# Altium schematic symbol library HeltecModule.SCHLIB: 8 symbols
Pins are listed as number, name and electrical type; pins without a type are passive.

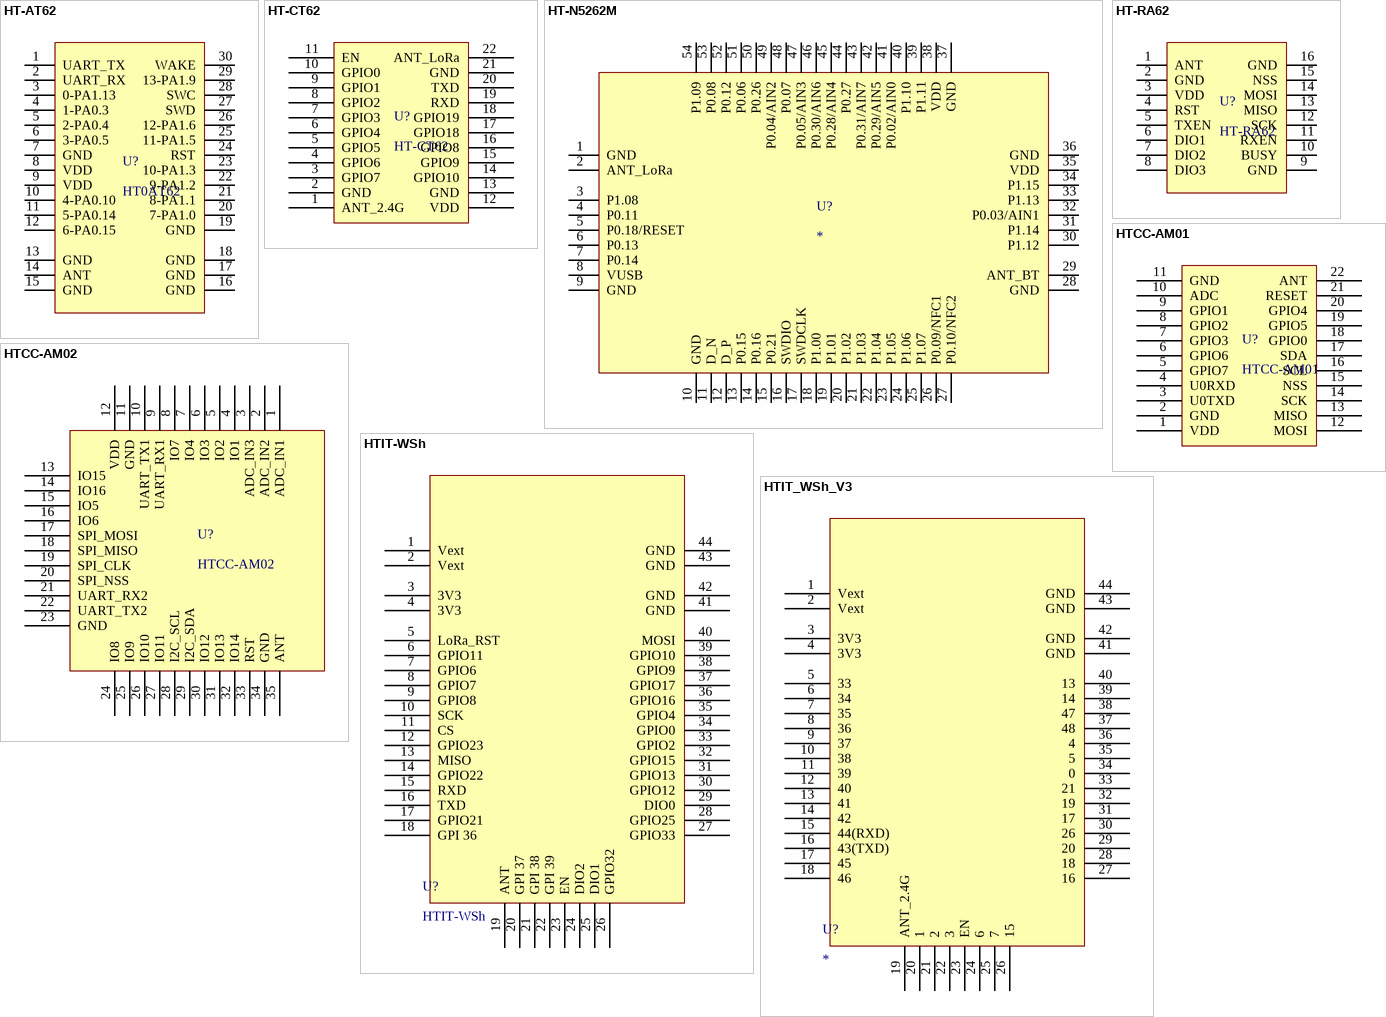
[diagram p0: symbols HT-AT62 to HTIT_WSh_V3]

## HT-AT62
designator U?, comment HT0AT62
Value: HT0AT62
footprint HT-AT62
pins: 1 UART_TX, 2 UART_RX, 3 0-PA1.13, 4 1-PA0.3, 5 2-PA0.4, 6 3-PA0.5, 7 GND, 8 VDD, 9 VDD, 10 4-PA0.10, 11 5-PA0.14, 12 6-PA0.15, 13 GND, 14 ANT, 15 GND, 16 GND, 17 GND, 18 GND, 19 GND, 20 7-PA1.0, 21 8-PA1.1, 22 9-PA1.2, 23 10-PA1.3, 24 RST, 25 11-PA1.5, 26 12-PA1.6, 27 SWD, 28 SWC, 29 13-PA1.9, 30 WAKE

## HT-CT62
designator U?
Value: HT-CT62
footprint HTCC-AM01
pins: 1 ANT_2.4G, 2 GND, 3 GPIO7, 4 GPIO6, 5 GPIO5, 6 GPIO4, 7 GPIO3, 8 GPIO2, 9 GPIO1, 10 GPIO0, 11 EN, 12 VDD, 13 GND, 14 GPIO10, 15 GPIO9, 16 GPIO8, 17 GPIO18, 18 GPIO19, 19 RXD, 20 TXD, 21 GND, 22 ANT_LoRa

## HT-N5262M
designator U?
Value: *
footprint HT-N5262M (Footprint not found)
pins: 1 GND, 2 ANT_LoRa, 3 P1.08, 4 P0.11, 5 P0.18/RESET, 6 P0.13, 7 P0.14, 8 VUSB, 9 GND, 10 GND, 11 D_N, 12 D_P, 13 P0.15, 14 P0.16, 15 P0.21, 16 SWDIO, 17 SWDCLK, 18 P1.00, 19 P1.01, 20 P1.02, 21 P1.03, 22 P1.04, 23 P1.05, 24 P1.06, 25 P1.07, 26 P0.09/NFC1, 27 P0.10/NFC2, 28 GND, 29 ANT_BT, 30 P1.12, 31 P1.14, 32 P0.03/AIN1, 33 P1.13, 34 P1.15, 35 VDD, 36 GND, 37 GND, 38 VDD, 39 P1.11, 40 P1.10, 41 P0.02/AIN0, 42 P0.29/AIN5, 43 P0.31/AIN7, 44 P0.27, 45 P0.28/AIN4, 46 P0.30/AIN6, 47 P0.05/AIN3, 48 P0.07, 49 P0.04/AIN2, 50 P0.26, 51 P0.06, 52 P0.12, 53 P0.08, 54 P1.09

## HT-RA62
designator U?
Value: HT-RA62
footprint HT-RA62
pins: 1 ANT, 2 GND, 3 VDD, 4 RST, 5 TXEN, 6 DIO1, 7 DIO2, 8 DIO3, 9 GND, 10 BUSY, 11 RXEN, 12 SCK, 13 MISO, 14 MOSI, 15 NSS, 16 GND

## HTCC-AM01
designator U?
Value: HTCC-AM01
footprint HTCC-AM01
pins: 1 VDD, 2 GND, 3 U0TXD, 4 U0RXD, 5 GPIO7, 6 GPIO6, 7 GPIO3, 8 GPIO2, 9 GPIO1, 10 ADC, 11 GND, 12 MOSI, 13 MISO, 14 SCK, 15 NSS, 16 SCL, 17 SDA, 18 GPIO0, 19 GPIO5, 20 GPIO4, 21 RESET, 22 ANT

## HTCC-AM02
designator U?
Value: HTCC-AM02
footprint HTCC-AM02
pins: 1 ADC_IN1, 2 ADC_IN2, 3 ADC_IN3, 4 IO1, 5 IO2, 6 IO3, 7 IO4, 8 IO7, 9 UART_RX1, 10 UART_TX1, 11 GND, 12 VDD, 13 IO15, 14 IO16, 15 IO5, 16 IO6, 17 SPI_MOSI, 18 SPI_MISO, 19 SPI_CLK, 20 SPI_NSS, 21 UART_RX2, 22 UART_TX2, 23 GND, 24 IO8, 25 IO9, 26 IO10, 27 IO11, 28 I2C_SCL, 29 I2C_SDA, 30 IO12, 31 IO13, 32 IO14, 33 RST, 34 GND, 35 ANT

## HTIT-WSh
designator U?
HTIT-WSh模块; Value: HTIT-WSh
footprint HTIT-Wsh (Footprint not found)
pins: 1 Vext, 2 Vext, 3 3V3, 4 3V3, 5 LoRa_RST, 6 GPIO11, 7 GPIO6, 8 GPIO7, 9 GPIO8, 10 SCK, 11 CS, 12 GPIO23, 13 MISO, 14 GPIO22, 15 RXD, 16 TXD, 17 GPIO21, 18 GPI 36, 19 ANT, 20 GPI 37, 21 GPI 38, 22 GPI 39, 23 EN, 24 DIO2, 25 DIO1, 26 GPIO32, 27 GPIO33, 28 GPIO25, 29 DIO0, 30 GPIO12, 31 GPIO13, 32 GPIO15, 33 GPIO2, 34 GPIO0, 35 GPIO4, 36 GPIO16, 37 GPIO17, 38 GPIO9, 39 GPIO10, 40 MOSI, 41 GND, 42 GND, 43 GND, 44 GND

## HTIT_WSh_V3
designator U?
Value: HTIT-WSh_V3; SKU: *
footprint HTIT-Wsh (Footprint not found)
pins: 1 Vext, 2 Vext, 3 3V3, 4 3V3, 5 33, 6 34, 7 35, 8 36, 9 37, 10 38, 11 39, 12 40, 13 41, 14 42, 15 44(RXD), 16 43(TXD), 17 45, 18 46, 19 ANT_2.4G, 20 1, 21 2, 22 3, 23 EN, 24 6, 25 7, 26 15, 27 16, 28 18, 29 20, 30 26, 31 17, 32 19, 33 21, 34 0, 35 5, 36 4, 37 48, 38 47, 39 14, 40 13, 41 GND, 42 GND, 43 GND, 44 GND